# Altium schematic symbol library MountedHole.SchLib: 1 symbol
Pins are listed as number, name and electrical type; pins without a type are passive.

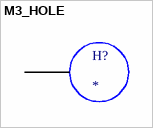
[diagram p0: symbol M3_HOLE]

## M3_HOLE
designator H?
footprint M3_MOUNTING_HOLE
pins: 1 M3_MOUNTING_HOLE